# Altium footprint library AMPHENOL_10151348-00011LF.PcbLib: 1 footprints
Each footprint in its own frame and in the unit in brackets; x right, y up, seen from the top. Pads: shape width x height; smd on the part's side, far side on the other; paste and mask are expansions set on the pad; w line width, h text height; cw(c..) or ccw(c..) is an arc to the next point about the centre after c.
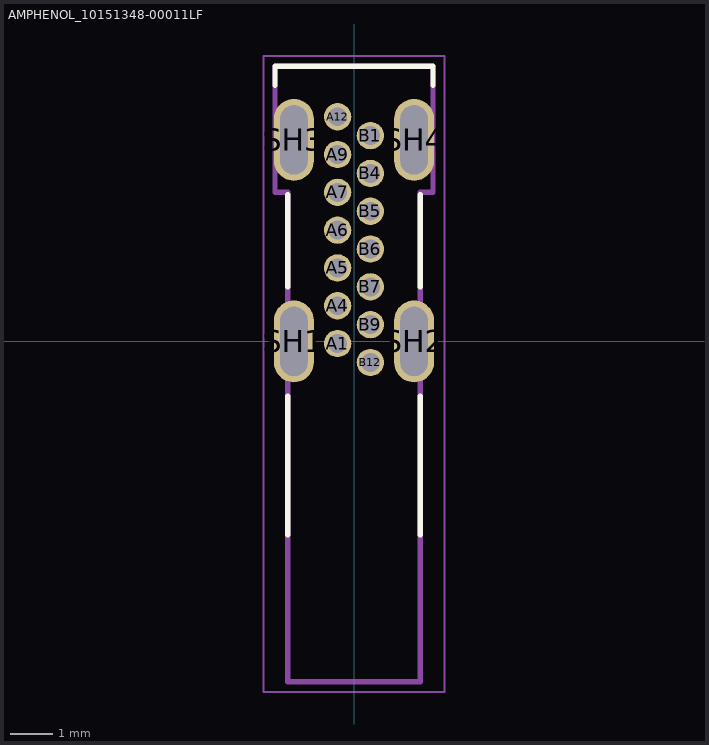
[diagram p0: the footprint, top view; thin cyan lines are the x and y axes]

## AMPHENOL_10151348-00011LF [mm]
height 9.14
pads (18):
  round 0.65 hole 0.45 mask+0.102: A1(-0.39,-0.05) A4(-0.39,0.85) A5(-0.39,1.75) A6(-0.39,2.65) A7(-0.39,3.55) A9(-0.39,4.45) A12(-0.39,5.35) B1(0.39,4.9) B4(0.39,4) B5(0.39,3.1) B6(0.39,2.2) B7(0.39,1.3) B9(0.39,0.4) B12(0.39,-0.5)
  oval 0.95x1.95 hole 0.65 slot 1.65 at 90 deg mask+0.102: SH1(-1.43,0) SH2(1.43,0) SH3(-1.43,4.8) SH4(1.43,4.8)
Top Overlay:
  lines w0.127: -1.88,6.1 -1.88,6.55 1.88,6.55 1.88,6.1 ; -1.58,-4.6 -1.58,-1.3 ; -1.58,1.3 -1.58,3.5 ; 1.58,-4.6 1.58,-1.3 ; 1.58,1.3 1.58,3.5
Assembly Top:
  lines w0.127: -1.88,3.55 -1.88,6.55 1.88,6.55 1.88,3.55 1.58,3.55 1.58,-8.1 -1.58,-8.1 -1.58,-4.6 -1.58,3.55 -1.88,3.55
Courtyard Top:
  lines w0.05: -2.155,-8.35 -2.155,6.8 2.155,6.8 2.155,-8.35 -2.155,-8.35
3D body "step_temp.STEP": height 9.04, standoff -2.5, extent -1.88,-8.114 1.88,6.536